# Altium schematic symbol library TPS631000DRLR.SchLib: 1 symbol
Pins are listed as number, name and electrical type; pins without a type are passive.

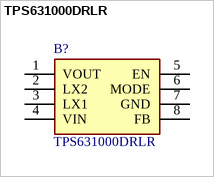
[diagram p0: symbol TPS631000DRLR]

## TPS631000DRLR
designator B?
Switching Voltage Regulators 1.5-A output current, high power density buck-boost converter; Manufacturer_Name: Texas Instruments; Geometry.Height: 0.6mm; Mouser Part Number: 595-TPS631000DRLR; Mouser Price/Stock: https://www.mouser.co.uk/ProductDetail/Texas-Instruments/TPS631000DRLR?qs=rSMjJ%252B1ewcRYwoN2deTeNA%3D%3D; Manufacturer_Part_Number: TPS631000DRLR; Datasheet Link: https://www.ti.com/lit/ds/symlink/tps631000.pdf?ts=1652152702265
footprint SOTFL50P160X60-8N
pins: 1 VOUT, 2 LX2, 3 LX1, 4 VIN, 5 EN, 6 MODE, 7 GND, 8 FB